# Altium footprint library Footprints.PcbLib: 67 footprints (part 3 of 5)
Each footprint in its own frame and in the unit in brackets; x right, y up, seen from the top. Pads: shape width x height; smd on the part's side, far side on the other; paste and mask are expansions set on the pad; w line width, h text height; cw(c..) or ccw(c..) is an arc to the next point about the centre after c.
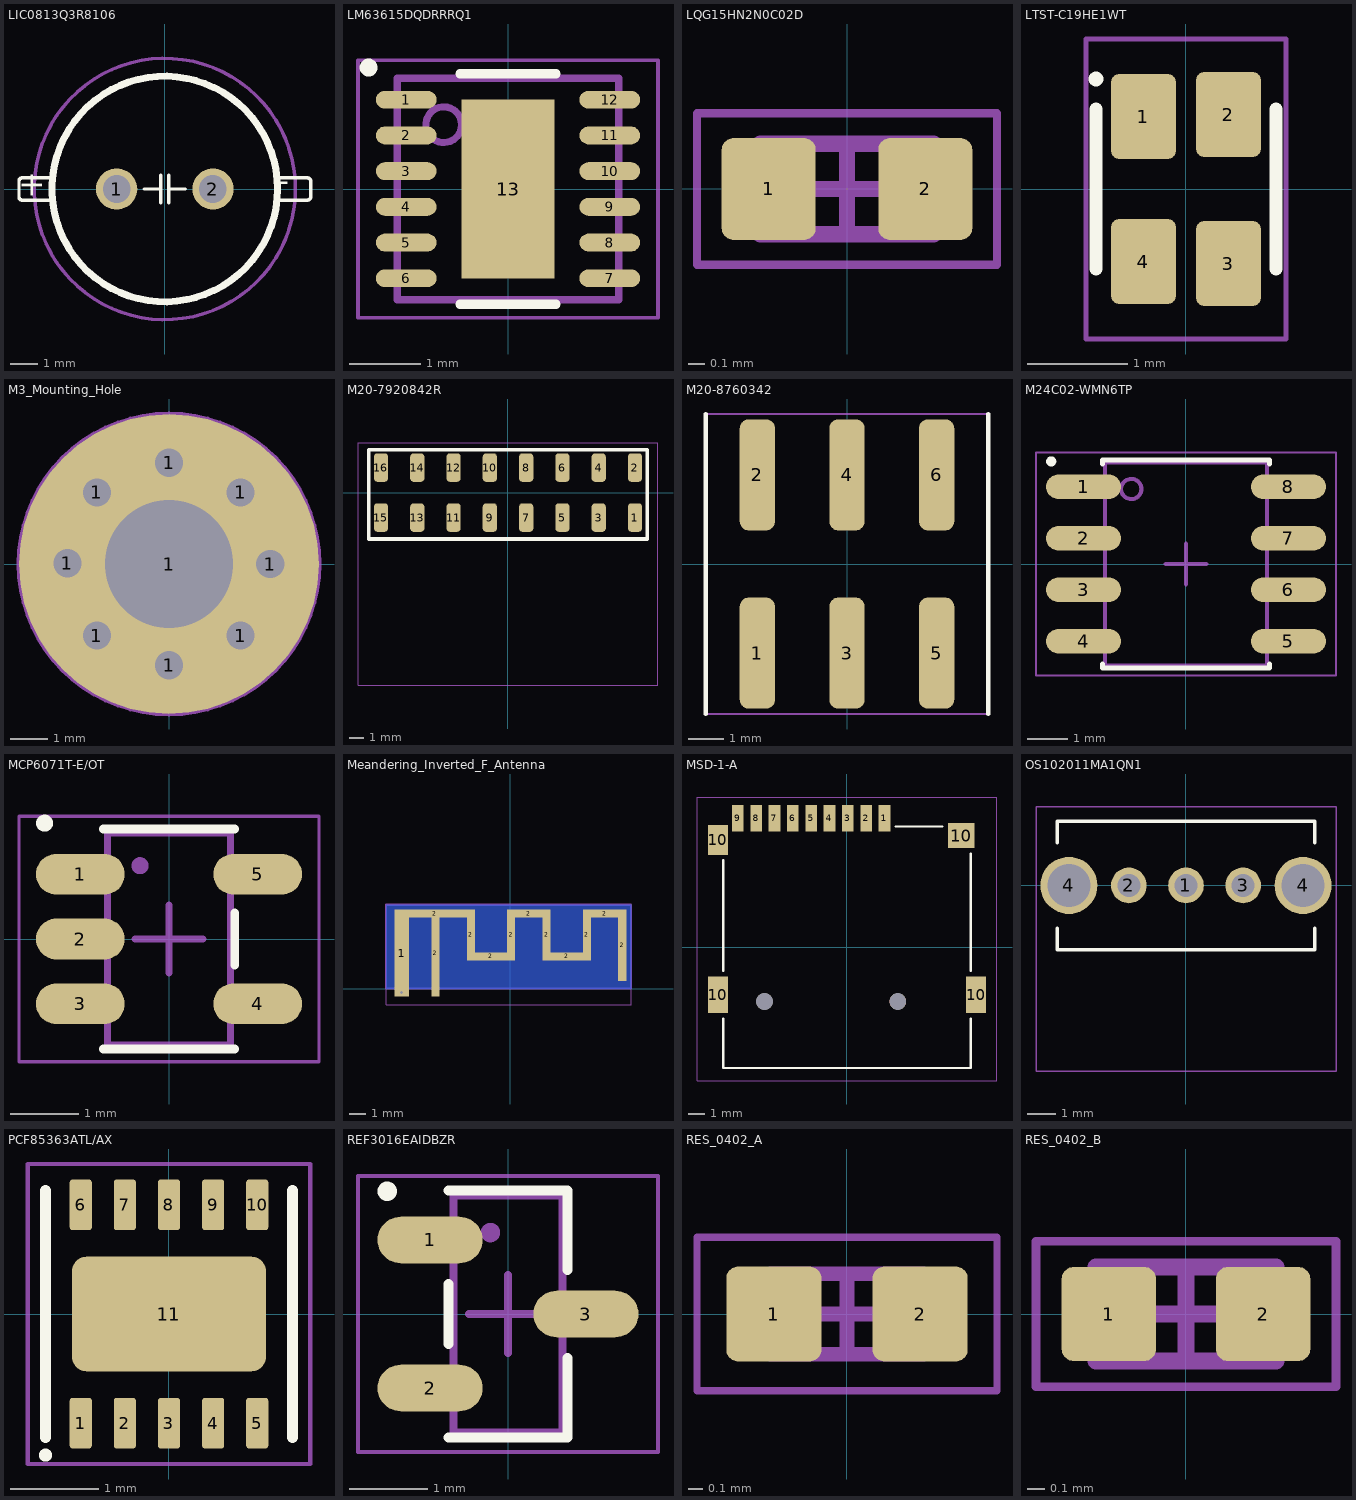
[diagram p2: the footprints below, top view; thin cyan lines are the x and y axes]

## LIC0813Q3R8106 [mm] "10 F (EDLC) Supercapacitor 3.8 V Radial, Can 510mOhm @ 1kHz 1000 Hrs @ 85°C"
height 8
pads (2):
  round 1.5 hole 1: 1(-1.75,0) 2(1.75,0)
Top Overlay:
  circle w0.254: c0,0 r4.1
  lines w0.127: -4.169,-0.381 cw(c-4.188,-0.381) -4.188,-0.4 -5.2,-0.4 cw(c-5.2,-0.3) -5.3,-0.3 -5.3,0.3 cw(c-5.2,0.3) -5.2,0.4 -4.08,0.4 ; -0.75,0 -0.2,0 ; -0.15,-0.5 -0.15,0.5 ; 0.15,-0.5 0.15,0.5 ; 0.15,0 0.75,0 ; 4.08,-0.4 5.2,-0.4 ccw(c5.2,-0.3) 5.3,-0.3 5.3,0.3 ccw(c5.2,0.3) 5.2,0.4 4.188,0.4
  text "-" at 4.08,-0.4 h1.52
  text "+" at -4.169,-0.381 h1.52
Bottom Overlay:
  circle w0.254: c0,0 r4.1
  lines w0.127: -4.089,-0.4 -2.969,-0.4 ccw(c-2.969,-0.3) -2.869,-0.3 -2.869,0.3 ccw(c-2.969,0.3) -2.969,0.4 -3.981,0.4 ccw(c-3.981,0.381) -4,0.381 ; 4.031,-0.381 cw(c4.012,-0.381) 4.012,-0.4 3,-0.4 cw(c3,-0.3) 2.9,-0.3 2.9,0.3 cw(c3,0.3) 3,0.4 4.12,0.4
  text "+" at -4,0.381 h1.52
  text "-" at 4.12,0.4 h1.52
Top Courtyard:
  circle w0.127: c0,0 r4.75
Top Designator:
  text ".Designator" at -2.247,-0.225 h1
3D body "LIC0813Q3R8106.step": height 14.5, standoff -2, extent -4,-4 4,4

## LM63615DQDRRRQ1 [mm] "SON, 12-Leads, Body 3.00x3.00mm, Pitch 0.50mm, Thermal Pad 2.50x1.30mm, IPC Medium Density"
height 0.8
pads (13):
  oval 0.85x0.25 smd: 1(-1.425,1.25) 2(-1.425,0.75) 3(-1.425,0.25) 4(-1.425,-0.25) 5(-1.425,-0.75) 6(-1.425,-1.25) 7(1.425,-1.25) 8(1.425,-0.75) 9(1.425,-0.25) 10(1.425,0.25) 11(1.425,0.75) 12(1.425,1.25)
  rect 1.3x2.5 smd paste-0.306: 13(0,0)
Top Overlay:
  circle w0.125: c-1.952,1.7 r0.062
  lines w0.127: -0.673,-1.613 0.673,-1.613 ; -0.673,1.613 0.673,1.613
Top Courtyard:
  lines w0.05: -2.1,-1.8 2.1,-1.8 2.1,1.8 -2.1,1.8 -2.1,-1.8
Top Assembly:
  circle w0.1: c-0.9,0.9 r0.25
  lines w0.1: -1.55,-1.55 1.55,-1.55 1.55,1.55 -1.55,1.55 -1.55,-1.55
Top Designator:
  text ".Designator" at -2.247,-0.225 h1
Top Component Center:
  lines w0.1: -0.5,0 0.5,0 ; 0,-0.5 0,0.5
3D body "LM63615DQDRRRQ1.step": height 0.8, standoff 0, extent -1.501,-1.5 1.501,1.5

## LQG15HN2N0C02D [mm] "Chip Inductor, 2-Leads, Body 1.00x0.50mm, IPC Medium Density"
height 0.5
pads (2):
  rrect25% 0.57x0.62 smd: 1(-0.475,0) 2(0.475,0)
Top Courtyard:
  lines w0.05: -0.91,-0.46 -0.91,0.46 0.91,0.46 0.91,-0.46 -0.91,-0.46
Top Assembly:
  lines w0.1: -0.525,-0.275 -0.525,0.275 0.525,0.275 0.525,-0.275 -0.525,-0.275
Top Designator:
  text ".Designator" at -2.247,-0.225 h1
Top Component Center:
  lines w0.1: -0.275,0 0.275,0 ; 0,-0.275 0,0.275
3D body "LQG15HN2N0C02D_NEW.step": height 0.5, standoff 0, extent -0.5,-0.25 0.5,0.25

## LTST-C19HE1WT [mm] "Red, Green, Blue (RGB) 624nm Red, 525nm Green, 470nm Blue LED Indication - Discrete 2.1V Red, 3.35V Green, 3.35V Blue 0606 (1616 Metric)"
pads (4):
  rrect25% 0.65x0.85 smd: 1(-0.425,0.725) 2(0.425,0.745) 3(0.425,-0.745) 4(-0.425,-0.725)
Top Overlay:
  circle w0.127: c-0.9,1.1 r0.01
  lines w0.127: -0.9,-0.8 -0.9,0.8 ; 0.9,-0.8 0.9,0.8
Top Courtyard:
  lines w0.05: -1,-1.5 1,-1.5 1,1.5 -1,1.5 -1,-1.5
Top Designator:
  text ".Designator" at -2.247,-0.225 h1
3D body "LTST-C19HE1WT.STEP": height 0.35, standoff 0, extent -0.8,-0.8 0.8,0.8

## M3_Mounting_Hole [mm] "Mounting Hole for M3"
pads (9):
  round 1 hole 0.75: 1(-2.708,0.022) 1(-1.922,-1.908) 1(-1.922,1.91) 1(0,-2.7) 1(0,2.7) 1(1.909,-1.909) 1(1.909,1.909) 1(2.7,0)
  round 8 hole 3.4: 1(0,0)
Top Courtyard:
  circle w0.127: c0,0 r4

## M20-7920842R [mm] "16 Position Receptacle Connector 0.100\" (2.54mm) Surface Mount, Right Angle Gold"
pads (16):
  rrect50% 1x2 smd: 1(8.89,-1.75) 2(8.89,1.75) 3(6.35,-1.75) 4(6.35,1.75) 5(3.81,-1.75) 6(3.81,1.75) 7(1.27,-1.75) 8(1.27,1.75) 9(-1.27,-1.75) 10(-1.27,1.75) 11(-3.81,-1.75) 12(-3.81,1.75) 13(-6.35,-1.75) 14(-6.35,1.75) 15(-8.89,-1.75) 16(-8.89,1.75)
Top Overlay:
  lines w0.254: -9.75,-3.25 9.75,-3.25 9.75,3 -9.75,3 -9.75,-3.25
Top Courtyard:
  lines w0.05: -10.5,-13.5 10.5,-13.5 10.5,3.5 -10.5,3.5 -10.5,-13.5
Top Designator:
  text ".Designator" at -2.247,-0.225 h1
3D body "m20-7920842r.stp": height 5, standoff 0, extent -10.285,-13.125 10.285,2.275

## M20-8760342 [mm] "Connector Header Surface Mount 6 position 0.100\" (2.54mm)"
pads (6):
  rrect50% 1x3.15 smd: 1(-2.54,-2.525) 2(-2.54,2.525) 3(0,-2.525) 4(0,2.525) 5(2.54,-2.525) 6(2.54,2.525)
Top Overlay:
  lines w0.127: -4,-4.25 -4,4.25 ; 4,-4.25 4,4.25
Top Courtyard:
  lines w0.05: -4,-4.25 4,-4.25 4,4.25 -4,4.25 -4,-4.25
3D body "m20-8760342.stp": height 9.9, standoff -0.03, extent -3.81,-3.6 3.81,3.6

## M24C02-WMN6TP [mm] "SOIC, 8-Leads, Body 4.90x3.90mm, Pitch 1.27mm, IPC Medium Density"
height 1.75
pads (8):
  oval 1.85x0.6 smd: 1(-2.525,1.905) 2(-2.525,0.635) 3(-2.525,-0.635) 4(-2.525,-1.905) 5(2.525,-1.905) 6(2.525,-0.635) 7(2.525,0.635) 8(2.525,1.905)
Top Overlay:
  circle w0.125: c-3.325,2.53 r0.062
  lines w0.127: -2.063,-2.468 -2.063,-2.564 2.064,-2.564 2.064,-2.468 ; -2.063,2.468 -2.063,2.564 2.064,2.564 2.064,2.468
Top Courtyard:
  lines w0.05: -3.7,-2.75 -3.7,2.75 3.7,2.75 3.7,-2.75 -3.7,-2.75
Top Assembly:
  circle w0.1: c-1.35,1.85 r0.25
  lines w0.1: -2,-2.5 -2,2.5 2,2.5 2,-2.5 -2,-2.5
Top Designator:
  text ".Designator" at -2.247,-0.225 h1
Top Component Center:
  lines w0.1: -0.5,0 0.5,0 ; 0,-0.5 0,0.5
3D body "M24C02-WMN6TP.step": height 1.75, standoff 0, extent -3,-2.45 3,2.45

## MCP6071T-E/OT [mm] "SOT23, 5-Leads, Body 2.90x2.70mm, Pitch 0.95mm, IPC Medium Density"
height 1.45
pads (5):
  oval 1.3x0.6 smd: 1(-1.3,0.95) 2(-1.3,0) 3(-1.3,-0.95) 4(1.3,-0.95) 5(1.3,0.95)
Top Overlay:
  circle w0.125: c-1.825,1.7 r0.062
  lines w0.127: -0.964,-1.613 0.964,-1.613 ; -0.964,1.613 0.964,1.613 ; 0.964,-0.386 0.964,0.386
Top Courtyard:
  lines w0.05: -2.2,-1.8 -2.2,1.8 2.2,1.8 2.2,-1.8 -2.2,-1.8
Top Assembly:
  circle w0.125: c-0.425,1.075 r0.062
  lines w0.1: -0.9,-1.55 -0.9,1.55 0.9,1.55 0.9,-1.55 -0.9,-1.55
Top Designator:
  text ".Designator" at -2.247,-0.225 h1
Top Component Center:
  lines w0.1: -0.5,0 0.5,0 ; 0,-0.5 0,0.5
3D body: height 1.45, standoff 0, extent -0.775,-1.45 0.775,1.45

## Meandering_Inverted_F_Antenna [mm]
pads (13):
  round 0.4 hole 0.2 mask+0: 1(-6.75,-0.25)
  rect 0.9x5.4 smd paste-2539.97: 1(-6.75,2.2)
  rect 5x0.5 smd paste-2539.97: 2(-4.7,4.65)
  rect 0.5x5.4 smd paste-2539.97: 2(-4.65,2.2)
  rect 0.5x3.14 smd paste-2539.97: 2(-2.45,3.33) 2(0.05,3.33) 2(2.25,3.33) 2(4.75,3.33)
  rect 3x0.5 smd paste-2539.97: 2(-1.2,2) 2(3.5,2)
  rect 2.7x0.5 smd paste-2539.97: 2(1.15,4.65) 2(5.85,4.65)
  rect 0.5x4.44 smd paste-2539.97: 2(6.95,2.68)
Bottom Layer:
  pour cut-out: -7.7,5.2 7.5,5.2 7.5,0 -7.7,0
Top Courtyard:
  lines w0.05: -7.7,-1 7.5,-1 7.5,5.2 -7.7,5.2 -7.7,-1
Top Assembly:
  lines w0.127: -7.7,0 7.5,0 7.5,5.2 -7.7,5.2 -7.7,0
Top Designator:
  text ".Designator" at -2.247,-0.225 h1

## MSD-1-A [mm]
pads (15):
  rect 0.7x1.6 smd: 1(2.25,7.75) 2(1.15,7.75) 3(0.05,7.75) 4(-1.05,7.75) 5(-2.15,7.75) 6(-3.25,7.75) 7(-4.35,7.75) 8(-5.45,7.75) 9(-6.55,7.75)
  rect 1.2x2.2 smd: 10(-7.75,-2.85) 10(7.75,-2.85)
  rect 1.2x1.8 smd: 10(-7.75,6.45)
  rect 1.6x1.5 smd: 10(6.85,6.7)
  round 1 hole 1 unplated: ""(-4.95,-3.25) ""(3.05,-3.25)
Top Overlay:
  lines w0.127: -7.425,-4.27 -7.425,-7.25 7.425,-7.25 7.425,-4.27 ; -7.425,-1.43 -7.425,5.23 ; 2.92,7.25 5.73,7.25 ; 7.425,-1.43 7.425,5.63
Top Courtyard:
  lines w0.05: -9,-8 9,-8 9,9 -9,9 -9,-8
Top Designator:
  text ".Designator" at -2.247,-0.225 h1
3D body "step_temp.STEP": height 1.85, standoff -0.55, extent -8.13,-7.25 8.02,7.8

## OS102011MA1QN1 [mm] "Slide Switch SPDT Through Hole, Right Angle"
pads (5):
  round 1.25 hole 0.8: 1(0,0) 2(-2,0) 3(2,0)
  round 2 hole 1.5: 4(-4.1,0) 4(4.1,0)
Top Overlay:
  lines w0.127: -4.5,-1.5 -4.5,-2.25 4.5,-2.25 4.5,-1.5 ; -4.5,1.5 -4.5,2.25 4.5,2.25 4.5,1.5
Top Courtyard:
  lines w0.05: -5.25,-6.5 5.25,-6.5 5.25,2.75 -5.25,2.75 -5.25,-6.5
Top Designator:
  text ".Designator" at -2.247,-0.225 h1
3D body "OS102011MA1QN1--3DModel-STEP-269445.STEP": height 4.7, standoff -2.79, extent -4.305,-6.185 4.305,2.197

## PCF85363ATL/AX [mm] "Real Time Clock (RTC) IC Clock/Calendar 64B I2C, 2-Wire Serial 10-XFDFN Exposed Pad"
pads (11):
  rrect25% 0.25x0.575 smd: 1(-1,-1.238) 2(-0.5,-1.238) 3(0,-1.238) 4(0.5,-1.238) 5(1,-1.238) 6(-1,1.238) 7(-0.5,1.238) 8(0,1.238) 9(0.5,1.238) 10(1,1.238)
  rrect25% 2.2x1.3 smd: 11(0,0)
Top Overlay:
  circle w0.127: c-1.4,-1.6 r0.01
  lines w0.127: -1.4,-1.4 -1.4,1.4 ; 1.4,-1.4 1.4,1.4
Top Courtyard:
  lines w0.05: -1.6,-1.7 1.6,-1.7 1.6,1.7 -1.6,1.7 -1.6,-1.7
Top Designator:
  text ".Designator" at -2.247,-0.225 h1
3D body "DFN_3ATLAX_NXP.step": height 0.51, standoff 0, extent -1.346,-1.346 1.346,1.346

## REF3016EAIDBZR [mm] "SOT23, 3-Leads, Body 2.92x2.37mm, Pitch 0.95mm, IPC Medium Density"
height 1.12
pads (3):
  oval 1.35x0.6 smd: 1(-1,0.95) 2(-1,-0.95) 3(1,0)
Top Overlay:
  circle w0.125: c-1.55,1.575 r0.062
  lines w0.127: -0.764,-1.583 0.763,-1.583 0.763,-0.564 ; -0.764,-0.386 -0.764,0.386 ; -0.764,1.583 0.763,1.583 0.763,0.564
Top Courtyard:
  lines w0.05: -1.925,-1.77 1.925,-1.77 1.925,1.77 -1.925,1.77 -1.925,-1.77
Top Assembly:
  circle w0.125: c-0.225,1.045 r0.062
  lines w0.1: -0.7,-1.52 0.7,-1.52 0.7,1.52 -0.7,1.52 -0.7,-1.52
Top Designator:
  text ".Designator" at -2.247,-0.225 h1
Top Component Center:
  lines w0.1: -0.5,0 0.5,0 ; 0,-0.5 0,0.5
3D body "REF3016EAIDBZR.step": height 1.12, standoff 0, extent -1.32,-1.46 1.32,1.46

## RES_0402_A [mm] "Chip Resistor, 2-Leads, Body 1.00x0.50mm, IPC Low Density"
height 0.35
pads (2):
  rrect25% 0.65x0.65 smd: 1(-0.5,0) 2(0.5,0)
Top Courtyard:
  lines w0.05: -1.025,-0.525 1.025,-0.525 1.025,0.525 -1.025,0.525 -1.025,-0.525
Top Assembly:
  lines w0.1: -0.525,-0.275 0.525,-0.275 0.525,0.275 -0.525,0.275 -0.525,-0.275
Top Designator:
  text ".Designator" at -2.247,-0.225 h1
Top Component Center:
  lines w0.1: -0.275,0 0.275,0 ; 0,-0.275 0,0.275
3D body "RES_0402_A.step": height 0.35, standoff 0, extent -0.5,-0.25 0.5,0.25

## RES_0402_B [mm] "Chip Resistor, 2-Leads, Body 1.00x0.50mm, IPC Medium Density"
height 0.35
pads (2):
  rrect25% 0.55x0.55 smd: 1(-0.45,0) 2(0.45,0)
Top Courtyard:
  lines w0.05: -0.875,-0.425 0.875,-0.425 0.875,0.425 -0.875,0.425 -0.875,-0.425
Top Assembly:
  lines w0.1: -0.525,-0.275 0.525,-0.275 0.525,0.275 -0.525,0.275 -0.525,-0.275
Top Designator:
  text ".Designator" at -2.247,-0.225 h1
Top Component Center:
  lines w0.1: -0.275,0 0.275,0 ; 0,-0.275 0,0.275
3D body "RES_0402_B.step": height 0.35, standoff 0, extent -0.5,-0.25 0.5,0.25